# Altium footprint library 固定柱.PcbLib: 140 footprints (part 2 of 9)
Each footprint in its own frame and in the unit in brackets; x right, y up, seen from the top. Pads: shape width x height; smd on the part's side, far side on the other; paste and mask are expansions set on the pad; w line width, h text height; cw(c..) or ccw(c..) is an arc to the next point about the centre after c.
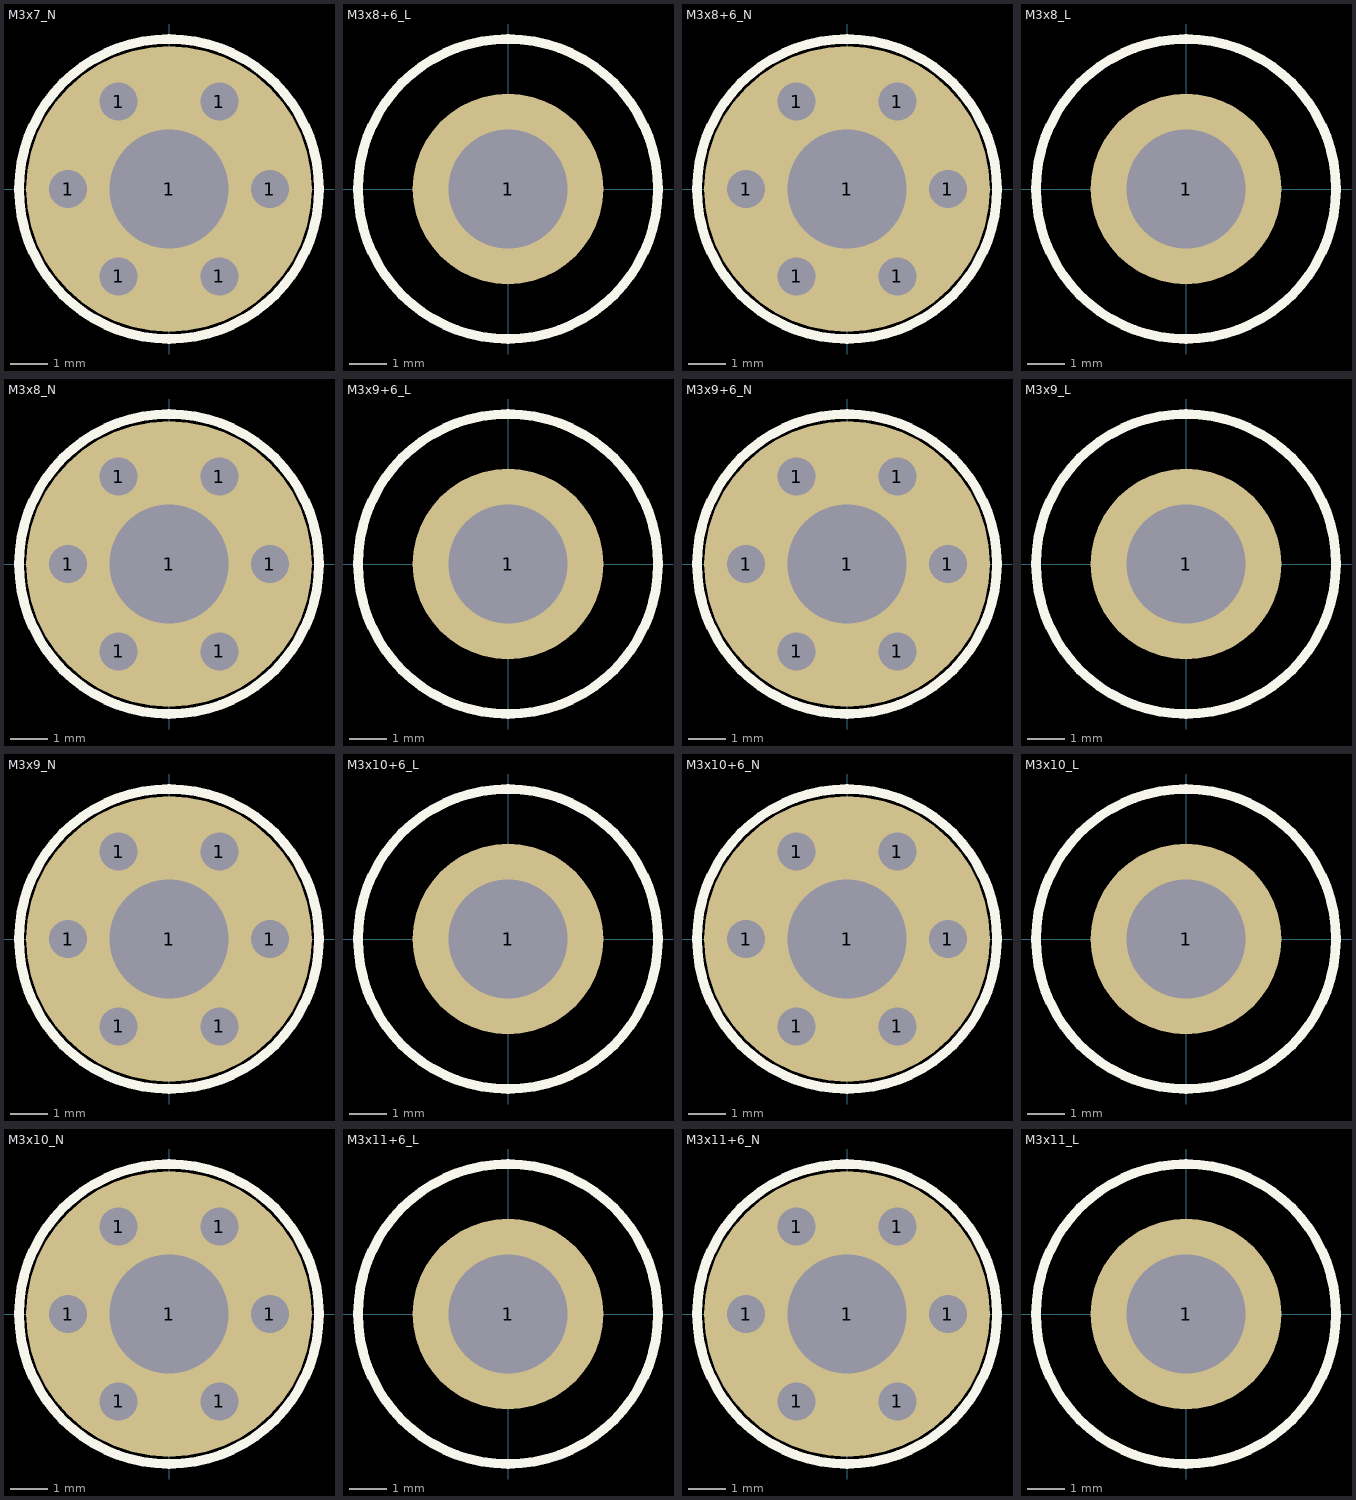
[diagram p1: the footprints below, top view; thin cyan lines are the x and y axes]

## M3x7_N [mil] "M3铜柱，长：7mm"
pads (7):
  round 40 hole 40: 1(-106,0) 1(-53,-91.8) 1(-53,91.8) 1(53,-91.8) 1(53,91.8) 1(106,0)
  round 300 hole 125: 1(0,0)
Top Overlay:
  circle w10: c0,0 r157.48
3D body "M3x7.STEP": height 277.56, standoff 1.96, extent -106.22,-92.52 106.22,92.52

## M3x8+6_L [mil] "M3铜柱，长：8mm，螺纹长：6mm"
pads (1):
  round 200 hole 125: 1(0,0)
Top Overlay:
  circle w10: c0,0 r157.48
3D body "M3x8+6.STEP": height 316.94, standoff -234.25, extent -106.22,-92.52 106.22,92.52

## M3x8+6_N [mil] "M3铜柱，长：8mm，螺纹长：6mm"
pads (7):
  round 40 hole 40: 1(-106,0) 1(-53,-91.8) 1(-53,91.8) 1(53,-91.8) 1(53,91.8) 1(106,0)
  round 300 hole 125: 1(0,0)
Top Overlay:
  circle w10: c0,0 r157.48
3D body "M3x8+6.STEP": height 316.94, standoff -234.25, extent -106.22,-92.52 106.22,92.52

## M3x8_L [mil] "M3铜柱，长：8mm"
pads (1):
  round 200 hole 125: 1(0,0)
Top Overlay:
  circle w10: c0,0 r157.48
3D body "M3x8.STEP": height 316.93, standoff 1.96, extent -106.22,-92.52 106.22,92.52

## M3x8_N [mil] "M3铜柱，长：8mm"
pads (7):
  round 40 hole 40: 1(-106,0) 1(-53,-91.8) 1(-53,91.8) 1(53,-91.8) 1(53,91.8) 1(106,0)
  round 300 hole 125: 1(0,0)
Top Overlay:
  circle w10: c0,0 r157.48
3D body "M3x8.STEP": height 316.93, standoff 1.96, extent -106.22,-92.52 106.22,92.52

## M3x9+6_L [mil] "M3铜柱，长：9mm，螺纹长：6mm"
pads (1):
  round 200 hole 125: 1(0,0)
Top Overlay:
  circle w10: c0,0 r157.48
3D body "M3x9+6.STEP": height 356.31, standoff -234.25, extent -106.22,-92.52 106.22,92.52

## M3x9+6_N [mil] "M3铜柱，长：9mm，螺纹长：6mm"
pads (7):
  round 40 hole 40: 1(-106,0) 1(-53,-91.8) 1(-53,91.8) 1(53,-91.8) 1(53,91.8) 1(106,0)
  round 300 hole 125: 1(0,0)
Top Overlay:
  circle w10: c0,0 r157.48
3D body "M3x9+6.STEP": height 356.31, standoff -234.25, extent -106.22,-92.52 106.22,92.52

## M3x9_L [mil] "M3铜柱，长：9mm"
pads (1):
  round 200 hole 125: 1(0,0)
Top Overlay:
  circle w10: c0,0 r157.48
3D body "M3x9.STEP": height 356.3, standoff 1.96, extent -106.22,-92.52 106.22,92.52

## M3x9_N [mil] "M3铜柱，长：9mm"
pads (7):
  round 40 hole 40: 1(-106,0) 1(-53,-91.8) 1(-53,91.8) 1(53,-91.8) 1(53,91.8) 1(106,0)
  round 300 hole 125: 1(0,0)
Top Overlay:
  circle w10: c0,0 r157.48
3D body "M3x9.STEP": height 356.3, standoff 1.96, extent -106.22,-92.52 106.22,92.52

## M3x10+6_L [mil] "M3铜柱，长：10mm，螺纹长：6mm"
pads (1):
  round 200 hole 125: 1(0,0)
Top Overlay:
  circle w10: c0,0 r157.48
3D body "M3x10+6.STEP": height 395.67, standoff -234.25, extent -106.22,-92.52 106.22,92.52

## M3x10+6_N [mil] "M3铜柱，长：10mm，螺纹长：6mm"
pads (7):
  round 40 hole 40: 1(-106,0) 1(-53,-91.8) 1(-53,91.8) 1(53,-91.8) 1(53,91.8) 1(106,0)
  round 300 hole 125: 1(0,0)
Top Overlay:
  circle w10: c0,0 r157.48
3D body "M3x10+6.STEP": height 395.67, standoff -234.25, extent -106.22,-92.52 106.22,92.52

## M3x10_L [mil] "M3铜柱，长：10mm"
pads (1):
  round 200 hole 125: 1(0,0)
Top Overlay:
  circle w10: c0,0 r157.48
3D body "M3x10.STEP": height 395.67, standoff 1.96, extent -106.22,-92.52 106.22,92.52

## M3x10_N [mil] "M3铜柱，长：10mm"
pads (7):
  round 40 hole 40: 1(-106,0) 1(-53,-91.8) 1(-53,91.8) 1(53,-91.8) 1(53,91.8) 1(106,0)
  round 300 hole 125: 1(0,0)
Top Overlay:
  circle w10: c0,0 r157.48
3D body "M3x10.STEP": height 395.67, standoff 1.96, extent -106.22,-92.52 106.22,92.52

## M3x11+6_L [mil] "M3铜柱，长：11mm，螺纹长：6mm"
pads (1):
  round 200 hole 125: 1(0,0)
Top Overlay:
  circle w10: c0,0 r157.48
3D body "M3x11+6.STEP": height 435.05, standoff -234.25, extent -106.22,-92.52 106.22,92.52

## M3x11+6_N [mil] "M3铜柱，长：11mm，螺纹长：6mm"
pads (7):
  round 40 hole 40: 1(-106,0) 1(-53,-91.8) 1(-53,91.8) 1(53,-91.8) 1(53,91.8) 1(106,0)
  round 300 hole 125: 1(0,0)
Top Overlay:
  circle w10: c0,0 r157.48
3D body "M3x11+6.STEP": height 435.05, standoff -234.25, extent -106.22,-92.52 106.22,92.52

## M3x11_L [mil] "M3铜柱，长：11mm"
pads (1):
  round 200 hole 125: 1(0,0)
Top Overlay:
  circle w10: c0,0 r157.48
3D body "M3x11.STEP": height 435.05, standoff 1.96, extent -106.22,-92.52 106.22,92.52